# Altium schematic symbol library SN74LVC1G74DCUR.SchLib: 1 symbol
Pins are listed as number, name and electrical type; pins without a type are passive.

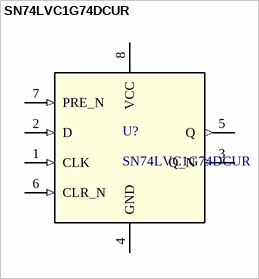
[diagram p0: symbol SN74LVC1G74DCUR]

## SN74LVC1G74DCUR
designator U?
Single Positive-Edge-Triggered D-Type Flip-Flop With Clear and Preset 8-VSSOP -40 to 125; Manufacturer_Name: Texas Instruments; Alternate_PartNumber: SN74LVC1G74DCUT; CompType: IC; TYPE: TYPE; RefDes: RefDes; Copyright: Copyright (C) 2026 Ultra Librarian. All rights reserved.; Manufacturer_Part_Number: SN74LVC1G74DCUR; Application_BuildNumber: *; PartNumber: SN74LVC1G74DCUR; PackageReference: DCU0008A; MountType: SMT; RoHS: Y; Manufacturer: Texas Instruments
footprint DCU0008A_N
pins: 1 CLK (in), 2 D (in), 3 Q_N (out), 4 GND (power), 5 Q (out), 6 CLR_N (in), 7 PRE_N (in), 8 VCC (power)